# Altium schematic symbol library MIC2288YD5-TR.Schlib: 1 symbol
Pins are listed as number, name and electrical type; pins without a type are passive.

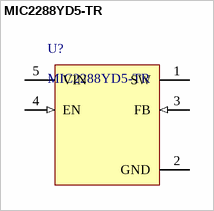
[diagram p0: symbol MIC2288YD5-TR]

## MIC2288YD5-TR
designator U?
DC-DC Switching Regulator, Boost, 2.5V to 10V in, 3.6V to 34V out, 1A out, SOT-23-5; Manufacturer: Microchip; Manufacturer Lifecycle Status: REL; Frequency: 1.2MHz; Max Duty Cycle: 90%; Max Junction Temperature (Tj): 125°C; Nominal Supply Current: 2.8mA; Number of Channels: 1; Output Configuration: Positive; Output Type: Adjustable; Synchronous Rectifier: No; Supplier: Newark; Supplier Part Number: MIC2288YD5-TR; Manufacturer Part Number: MIC2288YD5-TR; RoHS: Compliant; Category: Voltage Regulators - Switching; Stock: 15737; Pricing: 1=0.73, 50=0.627, 100=0.618, 250=0.608, 500=0.596, 1000=0.584, 2500=0.572, 5000=0.559 (USD); Projected EOL Date: 2034-01-20; Case/Package: TSOT; Country of Assembly: Malaysia; Country of Fabrication: United States of America; Country of Origin: Malaysia; Export Control Classification Number (ECCN) Code: EAR99; Height: 1mm; HS Code: 8542.39.0090; Harmonized Tariff Schedule (HTS) Code: 8542.39.0060; Lead Free: Lead Free; Length: 2.9mm; Lifecycle Status: Production; Max Supply Voltage: 10V; Max Operating Temperature: 125°C; Max Output current: 1A; Max Output Voltage: 34V; Min Input Voltage: 2.5V; Min Operating Temperature: -40°C; Min Supply Voltage: 2.5V; Mounting Technology: Surface Mount; Number of Outputs: 1; Pins: 5; Operating Supply Voltage: 10V; Output Current: 1A; Output Voltage: 34V; Radiation Hardening: No; REACH SVHC: Unaffected; Schedule B: 8542390000, 8542390000|8542390000|8542390000|8542390000|8542390000; Switching Frequency: 1.2MHz; Topology: Boost; Width: 1.6mm; ComponentLink1URL: https://datasheet.octopart.com:443/MIC2288YD5-TR-Microchip-datasheet-175858761.pdf?src-supplier=Microchip; ComponentLink1Description: https://datasheet.octopart.com:443/MIC2288YD5-TR-Microchip-datasheet-175858761.pdf?src-supplier=Microchip; ComponentLink2URL: https://datasheet.octopart.com:443/MIC2288YD5-TR-Microchip-datasheet-19250.pdf?src-supplier=Upverter; ComponentLink2Description: https://datasheet.octopart.com:443/MIC2288YD5-TR-Microchip-datasheet-19250.pdf?src-supplier=Upverter; ComponentLink3URL: https://datasheet.octopart.com:443/MIC2288YD5-TR-Microchip-datasheet-137404901.pdf?src-supplier=Upverter; ComponentLink3Description: https://datasheet.octopart.com:443/MIC2288YD5-TR-Microchip-datasheet-137404901.pdf?src-supplier=Upverter; ComponentLink4URL: https://datasheet.octopart.com:443/MIC2288YD5-TR-Microchip-datasheet-141892128.pdf?src-supplier=Augswan; ComponentLink4Description: https://datasheet.octopart.com:443/MIC2288YD5-TR-Microchip-datasheet-141892128.pdf?src-supplier=Augswan; ComponentLink5URL: https://datasheet.octopart.com:443/MIC2288YD5-TR-Microchip-datasheet-142675560.pdf?src-supplier=TME; ComponentLink5Description: https://datasheet.octopart.com:443/MIC2288YD5-TR-Microchip-datasheet-142675560.pdf?src-supplier=TME; ComponentLink6URL: https://datasheet.octopart.com:443/MIC2288YD5-TR-Microchip-datasheet-78862009.pdf?src-supplier=Microchip+SCT; ComponentLink6Description: https://datasheet.octopart.com:443/MIC2288YD5-TR-Microchip-datasheet-78862009.pdf?src-supplier=Microchip+SCT; ComponentLink7URL: http://sigma.octopart.com:80/188455326/materials_sheet/Microchip-MIC2288YD5-TR.pdf?src-supplier=Compliance+Statements; ComponentLink7Description: http://sigma.octopart.com:80/188455326/materials_sheet/Microchip-MIC2288YD5-TR.pdf?src-supplier=Compliance+Statements; ComponentLink8URL: http://sigma.octopart.com:80/rohs_statement/Microchip-company-71.pdf?src-supplier=Compliance+Statements; ComponentLink8Description: http://sigma.octopart.com:80/rohs_statement/Microchip-company-71.pdf?src-supplier=Compliance+Statements; ComponentLink9URL: http://sigma.octopart.com:80/reach_statement/Microchip-company-70.pdf?src-supplier=Compliance+Statements; ComponentLink9Description: http://sigma.octopart.com:80/reach_statement/Microchip-company-70.pdf?src-supplier=Compliance+Statements; ComponentLink10URL: http://sigma.octopart.com:80/conflict_mineral_statement/Microchip-company-69.pdf?src-supplier=Compliance+Statements; ComponentLink10Description: http://sigma.octopart.com:80/conflict_mineral_statement/Microchip-company-69.pdf?src-supplier=Compliance+Statements; ComponentLink11URL: http://sigma.octopart.com:80/conflict_mineral_statement/Microchip-company-68.pdf?src-supplier=Compliance+Statements; ComponentLink11Description: http://sigma.octopart.com:80/conflict_mineral_statement/Microchip-company-68.pdf?src-supplier=Compliance+Statements
pins: 1 SW (power), 2 GND (power), 3 FB (in), 4 EN (in), 5 VIN (power)